# Altium footprint library Connectors.PcbLib: 319 footprints (part 15 of 20)
Each footprint in its own frame and in the unit in brackets; x right, y up, seen from the top. Pads: shape width x height; smd on the part's side, far side on the other; paste and mask are expansions set on the pad; w line width, h text height; cw(c..) or ccw(c..) is an arc to the next point about the centre after c.
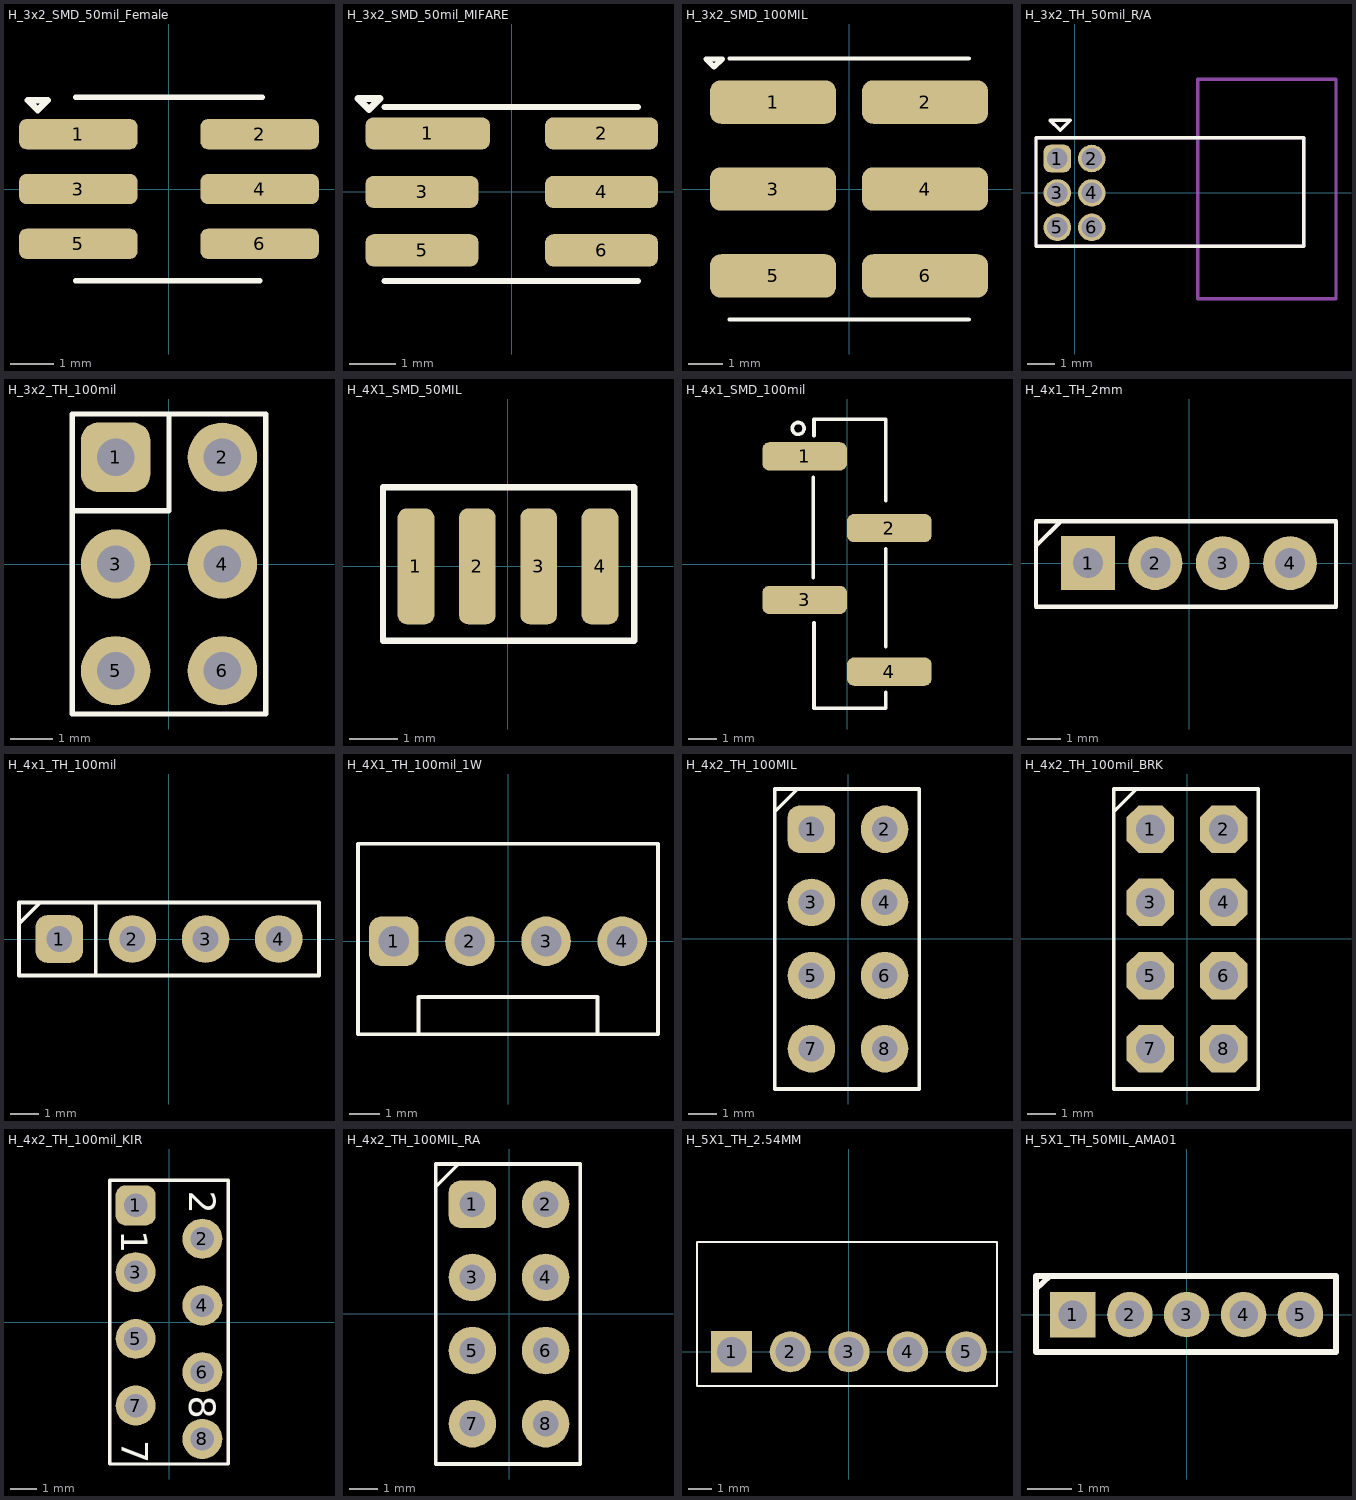
[diagram p14: the footprints below, top view; thin cyan lines are the x and y axes]

## H_3x2_SMD_50mil_Female [mm] "/ 20201015 / C-D Viveros"
pads (6):
  rrect50% 2.75x0.7 smd: 1(-2.1,1.27) 2(2.1,1.27) 3(-2.1,0) 4(2.1,0) 5(-2.1,-1.27) 6(2.1,-1.27)
Top Overlay:
  lines w0.127: -2.159,-2.121 2.1,-2.121 ; -2.159,2.121 2.159,2.121
  lines w0.152: -3.271,2.059 -3.042,1.83 -2.812,2.059 -3.271,2.059
3D body "CLP-103-02-F-D.stp": height 2.3, standoff 0.01, extent -2.159,-2.121 2.159,2.121

## H_3x2_SMD_50mil_MIFARE [mm] "/ 20190222 / C-A.Serna.A"
pads (6):
  rrect50% 2.7x0.7 smd: 1(-1.825,1.27)
  rrect50% 2.45x0.7 smd: 2(1.95,1.27) 3(-1.95,0) 4(1.95,0) 5(-1.95,-1.27) 6(1.95,-1.27)
Top Overlay:
  lines w0.127: -2.762,-1.937 2.738,-1.937 ; -2.762,1.844 2.738,1.844
  lines w0.152: -3.34,2.03 -2.86,2.03 -3.1,1.79 -3.34,2.03
3D body "20021121-00006XXLFc.stp": height 4.5, standoff 0, extent -2.762,-1.937 2.738,1.873

## H_3x2_SMD_100MIL [mm] "/ 20191030 / C-D.Viveros"
pads (6):
  rrect50% 3.68x1.27 smd: 1(-2.22,2.54) 2(2.22,2.54) 3(-2.22,0) 4(2.22,0) 5(-2.22,-2.54) 6(2.22,-2.54)
Top Overlay:
  lines w0.127: -3.492,-3.81 3.493,-3.81 ; -3.492,3.81 3.493,3.81
  lines w0.152: -4.18,3.8 -3.94,3.56 -3.7,3.8 -4.18,3.8
3D body "015910060.stp": height 9.66, standoff 0.01, extent -3.492,-3.81 3.493,3.81

## H_3x2_TH_50mil_R/A [mil] "/ 20200416/ C-A.Serna.A"
pads (6):
  rrect50% 40x40 hole 30 unplated: 1(-25,50)
  round 40 hole 30 unplated: 2(25,50) 3(-25,0) 4(25,0) 5(-25,-50) 6(25,-50)
Top Overlay:
  lines w5: -56,-77.48 332.92,-77.48 332.92,80.39 -56,80.39 -56,-77.48 ; -35.63,105.72 -6.34,105.72 -20.99,91.08 -35.63,105.72
Mechanical 15:
  lines w5: -56,-77.48 -56,80.39 332.92,80.39 332.92,-77.48 -56,-77.48 ; 179.1,-153.74 179.1,165.15 379.88,165.15 379.88,-153.74 179.1,-153.74
3D body "J202_3X2_Female-header.step": height 169.29, standoff 7.87, extent 179.1,-153.74 379.88,165.15
3D body "J707.step": height 128.44, standoff -115.27, extent -34,-77.48 332.92,80.39

## H_3x2_TH_100mil [mil] "/ 20190222 / C-A.Serna.A"
pads (6):
  rrect50% 65x65 hole 35: 1(-50,100)
  round 65 hole 35: 2(50,100) 3(-50,0) 4(50,0) 5(-50,-100) 6(50,-100)
Top Overlay:
  lines w5: -90.55,50 0,50 0,140.55 ; -90.55,-140.55 90.55,-140.55 90.55,140.55 -90.55,140.55 -90.55,-140.55

## H_4X1_SMD_50MIL [mm] "/20210701/J-E.Pachon"
pads (4):
  rrect50% 0.76x2.4 smd: 1(-1.905,0) 2(-0.635,0) 3(0.635,0) 4(1.905,0)
Top Overlay:
  lines w0.127: -2.591,-1.539 2.615,-1.539 2.615,1.636 -2.591,1.636 -2.591,-1.539

## H_4x1_SMD_100mil [mm] "/ 20190221 / C-A.Serna.A"
pads (4):
  rrect50% 3x1 smd: 1(-1.5,3.81) 2(1.5,1.27) 3(-1.5,-1.27) 4(1.5,-3.81)
Top Overlay:
  circle w0.127: c-1.727,4.801 r0.209
  lines w0.127: -1.194,-0.483 -1.194,3.073 ; -1.168,-2.083 -1.168,-5.029 -1.168,-5.105 1.372,-5.105 1.372,-4.547 ; -1.168,4.547 -1.168,5.131 1.372,5.131 1.372,2.235 ; 1.372,-2.921 1.372,0.533
3D body "Download_STP_61000418221 (rev1).stp": height 9.27, standoff -0.06, extent -2.425,-5.08 2.575,5.08

## H_4x1_TH_2mm [mm] "/20210714/M-C.Calderon"
pads (4):
  rect 1.6x1.6 hole 0.889: 1(-3,0)
  round 1.6 hole 0.889: 2(-1,0) 3(1,0) 4(3,0)
Top Overlay:
  lines w0.127: -4.549,0.505 -3.809,1.245 ; -4.549,-1.295 -4.549,1.245 4.366,1.245 4.366,-1.295 -4.549,-1.295
3D body "m22-2010405_asm.stp": height 5.01, standoff -3.39, extent -4.006,-0.988 3.994,1.012

## H_4x1_TH_100mil [mil] "/ 20190222 / C-A.Serna.A"
pads (4):
  rrect50% 65x65 hole 35: 1(-150,0)
  round 65 hole 35: 2(-50,0) 3(50,0) 4(150,0)
Top Overlay:
  lines w5: -205,20.87 -175.87,50 ; -100,-50 -100,50 ; -205,-50 205.12,-50 205.12,50 -205,50 -205,-50

## H_4X1_TH_100mil_1W [mil] "/20200319/C-A.Serna.A"
pads (4):
  rrect50% 65x65 hole 40: 1(-150,0)
  round 65 hole 40: 2(-50,0) 3(50,0) 4(150,0)
Top Overlay:
  lines w5: -117.5,-122 -117.5,-73 117.5,-73 117.5,-122 ; -197,-122 -197,128 197,128 197,-122 -197,-122
3D body "022232041.stp": height 428.37, standoff -131.63, extent -197,-122 197,128

## H_4x2_TH_100MIL [mil] "/ 20210215 / M-C.Calderon"
pads (8):
  rrect50% 65x65 hole 35: 1(-50,150)
  round 65 hole 35: 2(50,150) 3(-50,50) 4(50,50) 5(-50,-50) 6(50,-50) 7(-50,-150) 8(50,-150)
Top Overlay:
  lines w5: -100,174.02 -70.08,203.94 ; -100,-205.12 -100,205 97.24,205 97.24,-205.12 -100,-205.12

## H_4x2_TH_100mil_BRK [mil] "/20210423/M-C.Calderon"
pads (8):
  oct 65x65 hole 40: 1(-50,150) 2(50,150) 3(-50,50) 4(50,50) 5(-50,-50) 6(50,-50) 7(-50,-150) 8(50,-150)
Top Overlay:
  lines w5: -100,174.02 -70.08,203.94 ; -100,-205.12 97.24,-205.12 97.24,205 -100,205 -100,-205.12

## H_4x2_TH_100mil_KIR [mil] "/ 20190221 / C-A.Serna.A"
pads (8):
  rrect50% 60x60 hole 35: 1(-50,175)
  round 60 hole 35: 2(50,125) 3(-50,75) 4(50,25) 5(-50,-25) 6(50,-75) 7(-50,-125) 8(50,-175)
Top Overlay:
  lines w5: -88.58,-212.52 -88.58,212.68 88.58,212.68 88.58,-212.52 -88.58,-212.52
  text "1" at -71.38,137.87 h40
  text "2" at 30,197 h40
  text "7" at -71,-177 h40
  text "8" at 30,-110.16 h40

## H_4x2_TH_100MIL_RA [mil] "/ 20210827 / N-A.Potosi"
pads (8):
  rrect50% 65x65 hole 35: 1(-50,150)
  round 65 hole 35: 2(50,150) 3(-50,50) 4(50,50) 5(-50,-50) 6(50,-50) 7(-50,-150) 8(50,-150)
Top Overlay:
  lines w5: -100,174.02 -70.08,203.94 ; -100,-205.12 -100,205 97.24,205 97.24,-205.12 -100,-205.12
3D body "825457-4--3DModel-STEP-1.STEP": height 242.63, standoff -125.48, extent -62.29,-200.91 483.18,199.09

## H_5X1_TH_2.54MM [mil] "/20210218/J-E.Pachon"
pads (5):
  rect 70x70 hole 50: 1(-200,0)
  round 70 hole 50: 2(-100,0) 3(0,0) 4(100,0) 5(200,0)
Top Overlay:
  lines w3.94: -258.97,-58.27 -258.97,187.01 252.36,187.01 252.36,-58.27 -258.97,-58.27
3D body "022288053.stp": height 98.5, standoff -134.5, extent -252.36,-12.25 247.64,484.74

## H_5X1_TH_50MIL_AMA01 [mil] "20220517 / E.Naranjo"
pads (5):
  rect 40x40 hole 25: 1(-100,0)
  round 40 hole 25: 2(-50,0) 3(0,0) 4(50,0) 5(100,0)
Top Overlay:
  lines w5: -132.48,22.5 -120,34 ; -132.48,-32.93 131.3,-32.93 131.3,34 -132.48,34 -132.48,-32.93